# Altium footprint library Orion-Bridge.PcbLib: 20 footprints (part 2 of 2)
Each footprint in its own frame and in the unit in brackets; x right, y up, seen from the top. Pads: shape width x height; smd on the part's side, far side on the other; paste and mask are expansions set on the pad; w line width, h text height; cw(c..) or ccw(c..) is an arc to the next point about the centre after c.
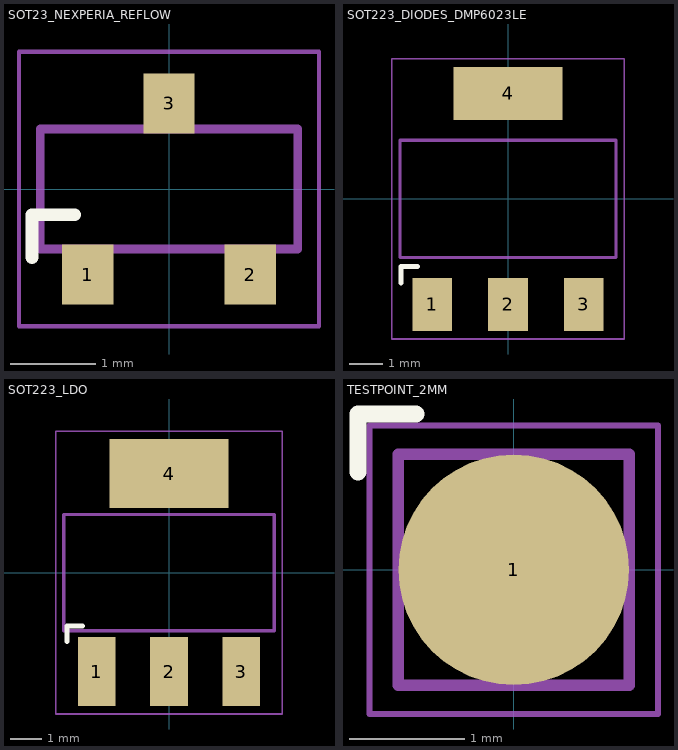
[diagram p1: the footprints below, top view; thin cyan lines are the x and y axes]

## SOT23_NEXPERIA_REFLOW [mm] "Nexperia SOT23 reflow footprint Fig10: 0.6 x 0.7 copper lands, 1.9 pin pitch and 2.0 row centres. Drawing is rotated 180 degrees to match existing top-view pin1 lower left, pin2 lower right, pin3 upper centre. Paste suggested0.5 x0.6, mask opening1.0 x1.0; set fabrication-specific expansions accordingly."
height 1.1
pads (3):
  rect 0.6x0.7 smd: 1(-0.95,-1) 2(0.95,-1) 3(0,1)
Top Overlay:
  lines w0.15: -1.6,-0.8 -1.6,-0.3 -1.1,-0.3
Component bodies:
  lines w0.1: -1.5,-0.7 1.5,-0.7 1.5,0.7 -1.5,0.7 -1.5,-0.7
Courtyards:
  lines w0.05: -1.75,-1.6 1.75,-1.6 1.75,1.6 -1.75,1.6 -1.75,-1.6
3D body: height 1.1, standoff 0.12, extent -1.5,-0.7 1.5,0.7
3D body: height 0.28, standoff 0.02, extent -1.19,-1.3 -0.71,-0.35
3D body: height 0.28, standoff 0.02, extent 0.71,-1.3 1.19,-0.35
3D body: height 0.28, standoff 0.02, extent -0.24,0.35 0.24,1.3
3D body: height 1.11, standoff 1.1, extent -1.12,0.232 -0.8,0.552

## SOT223_DIODES_DMP6023LE [mm] "Diodes DMP6023LE datasheet suggested SOT223 pad layout: C=2.30, C1=6.40, X=1.20, X1=3.30, Y=Y1=1.60. Pin 1 gate, 2 drain, 3 source, 4 drain tab."
height 1.65
pads (4):
  rect 1.2x1.6 smd: 1(-2.3,-3.2) 2(0,-3.2) 3(2.3,-3.2)
  rect 3.3x1.6 smd: 4(0,3.2)
Top Overlay:
  lines w0.15: -3.25,-2.55 -3.25,-2.05 -2.75,-2.05
Component bodies:
  lines w0.1: -3.275,-1.775 3.275,-1.775 3.275,1.775 -3.275,1.775 -3.275,-1.775
Courtyards:
  lines w0.05: -3.525,-4.25 3.525,-4.25 3.525,4.25 -3.525,4.25 -3.525,-4.25
3D body: height 1.65, standoff 0.12, extent -3.275,-1.775 3.275,1.775
3D body: height 0.28, standoff 0.02, extent -2.725,-3.525 -1.875,-1.45
3D body: height 0.28, standoff 0.02, extent -0.425,-3.525 0.425,-1.45
3D body: height 0.28, standoff 0.02, extent 1.875,-3.525 2.725,-1.45
3D body: height 0.28, standoff 0.02, extent -1.402,1.45 1.402,3.525
3D body: height 1.67, standoff 1.65, extent -2.256,0.834 -1.936,1.154

## SOT223_LDO [mm] "TI TPS7B69-Q1 DCY package drawing4202506/B p20: maximum body6.7x3.7, maximum height1.8, lead pitch2.3. Existing R2 engineering lands retained: 1.2x2.2 signal pads,3.8x2.2 tab,6.3 row centres. TI datasheet provides no DCY recommended land pattern; qualify solder process. Pin4 is GND_BUS tab."
height 1.8
pads (4):
  rect 1.2x2.2 smd: 1(-2.3,-3.15) 2(0,-3.15) 3(2.3,-3.15)
  rect 3.8x2.2 smd: 4(0,3.15)
Top Overlay:
  lines w0.15: -3.25,-2.2 -3.25,-1.7 -2.75,-1.7
Component bodies:
  lines w0.1: -3.35,-1.85 3.35,-1.85 3.35,1.85 -3.35,1.85 -3.35,-1.85
Courtyards:
  lines w0.05: -3.6,-4.5 3.6,-4.5 3.6,4.5 -3.6,4.5 -3.6,-4.5
3D body: height 1.8, standoff 0.12, extent -3.35,-1.85 3.35,1.85
3D body: height 0.28, standoff 0.02, extent -2.725,-3.475 -1.875,-1.525
3D body: height 0.28, standoff 0.02, extent -0.425,-3.475 0.425,-1.525
3D body: height 0.28, standoff 0.02, extent 1.875,-3.475 2.725,-1.525
3D body: height 0.28, standoff 0.02, extent -1.6,1.525 1.6,3.475
3D body: height 1.82, standoff 1.8, extent -2.304,0.876 -1.984,1.196

## TESTPOINT_2MM [mm] "2 mm exposed top-copper test pad; no paste"
pads (1):
  round 2 smd: 1(0,0)
Top Overlay:
  lines w0.15: -1.35,0.85 -1.35,1.35 -0.85,1.35
Component bodies:
  lines w0.1: -1,-1 1,-1 1,1 -1,1 -1,-1
Courtyards:
  lines w0.05: -1.25,-1.25 1.25,-1.25 1.25,1.25 -1.25,1.25 -1.25,-1.25
3D body: height 0.04, standoff 0, extent -1,-1 1,1